# Altium footprint library Amin-Library.PcbLib: 601 footprints (part 31 of 38)
Each footprint in its own frame and in the unit in brackets; x right, y up, seen from the top. Pads: shape width x height; smd on the part's side, far side on the other; paste and mask are expansions set on the pad; w line width, h text height; cw(c..) or ccw(c..) is an arc to the next point about the centre after c.
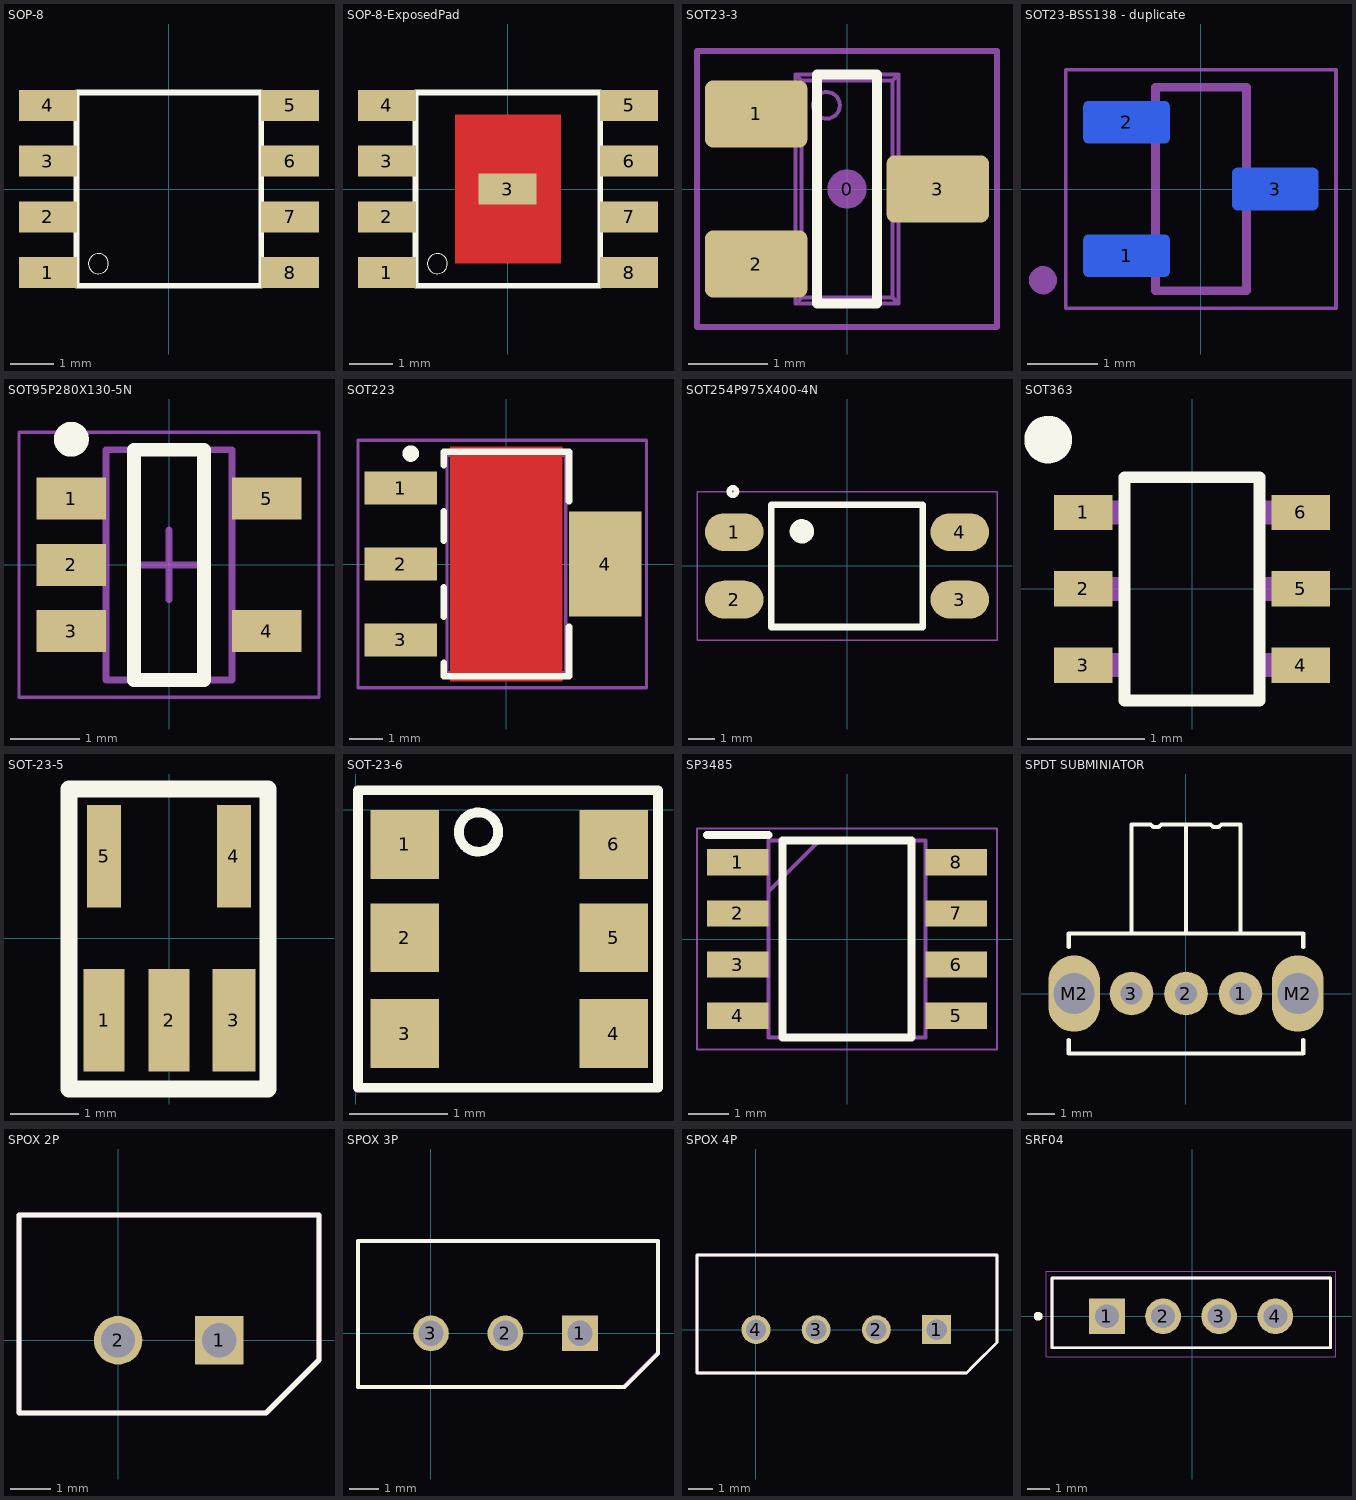
[diagram p30: the footprints below, top view; thin cyan lines are the x and y axes]

## SOP-8 [mil]
pads (8):
  rect 52x28 smd: 1(-108.27,-75) 2(-108.27,-25) 3(-108.27,25) 4(-108.27,75) 5(109,75) 6(109,25) 7(109,-25) 8(109,-75)
Top Overlay:
  circle w0: c-62.99,-67 r9
  lines w5: -82.68,-87 -82.68,86.61 83,86.61 83,-87 -82.68,-87
3D body "SOP8.stp": height 68.9, standoff 0, extent -118,-96.25 118.02,96.27

## SOP-8-ExposedPad [mil]
pads (9):
  rect 52x28 smd: 1(-108.27,-75) 2(-108.27,-25) 3(-108.27,25) 3(0,0) 4(-108.27,75) 5(109,75) 6(109,25) 7(109,-25) 8(109,-75)
Top Layer:
  rectangle: -47.24,-67 48,66.93
Top Overlay:
  circle w0: c-62.99,-67 r9
  lines w5: -82.68,-87 -82.68,86.61 83,86.61 83,-87 -82.68,-87

## SOT23-3 [mm] "SOT23, 3 pin"
height 1.003
pads (4):
  round 0.5 on Mech15: 0(0,0)
  rrect25% 1.3x0.85 smd: 1(-1.15,0.95) 2(-1.15,-0.95) 3(1.15,0)
Top Overlay:
  lines w0.127: -0.381,-1.45 0.381,-1.45 0.381,1.45 -0.381,1.45 -0.381,-1.45
  text "." at -2.125,0.95 h1.4
Mechanical 13:
  circle w0.05: c-0.26,1.06 r0.169
  lines w0.05: -1.19,-1.19 -1.19,-0.71 ; -1.19,0.71 -1.19,1.19 ; -1.099,-1.19 -1.099,-0.71 ; -1.099,0.71 -1.099,1.19 ; -1.074,-1.19 -1.074,-0.71 ; -1.074,0.71 -1.074,1.19 ; -0.825,-1.19 -0.825,-0.71 ; -0.825,0.71 -0.825,1.19 ; -0.65,-1.19 -1.4,-1.19 -1.4,-0.71 -0.65,-0.71 ; -0.65,0.71 -1.4,0.71 -1.4,1.19 -0.65,1.19 ; 0.65,-0.24 1.4,-0.24 1.4,0.24 0.65,0.24 ; 0.825,-0.24 0.825,0.24 ; 1.074,-0.24 1.074,0.24 ; 1.099,-0.24 1.099,0.24 ; 1.19,-0.24 1.19,0.24 ; -0.65,-1.45 -0.576,-1.376 ; -0.65,-1.45 -0.65,1.45 ; -0.65,-1.45 0.65,-1.45 ; -0.65,1.45 0.65,1.45 ; -0.65,1.45 -0.576,1.376 ; -0.576,-1.376 -0.576,1.376 ; -0.576,-1.376 0.576,-1.376 ; -0.576,1.376 0.576,1.376 ; 0.576,-1.376 0.576,1.376 ; 0.576,-1.376 0.65,-1.45 ; 0.576,1.376 0.65,1.45 ; 0.65,-1.45 0.65,1.45
Mechanical 15:
  lines w0.076: -1.9,-1.75 1.9,-1.75 1.9,1.75 -1.9,1.75 -1.9,-1.75
3D body "SOT23-3.STEP": height 1.29, standoff -0.01, extent -1.4,-1.45 1.4,1.45

## SOT23-BSS138 - duplicate [mm]
height 0.55
pads (3):
  rrect25% 1.23x0.6 smd far side: 1(-1.06,-0.95) 2(-1.06,0.95) 3(1.06,0)
Bottom Overlay:
  circle w0.2: c-2.25,-1.3 r0.1
  lines w0.127: -0.65,-1.57 0.65,-1.57 0.65,-0.62 ; -0.65,1.57 0.65,1.57 0.65,0.62
Mechanical 13:
  circle w0.2: c-2.25,-1.3 r0.1
  lines w0.127: -0.65,-1.45 -0.65,1.45 0.65,1.45 0.65,-1.45 -0.65,-1.45
Mechanical 15:
  lines w0.05: -1.925,-1.7 1.925,-1.7 1.925,1.7 -1.925,1.7 -1.925,-1.7
3D body "SOT-23.STEP": height 1, standoff 0, extent -1.3,-1.45 1.3,1.45

## SOT95P280X130-5N [mm] "SOT23, 5-Leads, Body 2.90x2.80mm, Pitch 0.95mm, IPC Medium Density"
height 1.3
pads (5):
  rect 1x0.6 smd: 1(-1.4,0.95) 2(-1.4,0) 3(-1.4,-0.95) 4(1.4,-0.95) 5(1.4,0.95)
Top Overlay:
  circle w0.25: c-1.4,1.8 r0.125
  lines w0.2: -0.5,-1.65 -0.5,1.65 0.5,1.65 0.5,-1.65 -0.5,-1.65
Mechanical 13:
  lines w0.1: -0.9,-1.65 0.9,-1.65 0.9,1.65 -0.9,1.65 -0.9,-1.65
Mechanical 15:
  lines w0.05: -2.15,-1.9 2.15,-1.9 2.15,1.9 -2.15,1.9 -2.15,-1.9
  lines w0.1: -0.5,0 0.5,0 ; 0,-0.5 0,0.5
3D body: height 1.3, standoff 0.05, extent -0.9,-1.65 0.9,1.65

## SOT223 [mm] "SOT223, 4-Leads, Body 6.5x3.5mm, Pitch 2.30mm-Designer Abbas Basereh"
height 1.8
pads (4):
  rect 2.2x1 smd: 1(-3.2,2.3) 2(-3.2,0) 3(-3.2,-2.3)
  rect 2.2x3.2 smd: 4(3,0)
Top Layer:
  pour cut-out: -1.7,3.556 1.7,3.556 1.7,-3.556 -1.7,-3.556
Top Overlay:
  circle w0.25: c-2.9,3.35 r0.125
  lines w0.2: -1.9,-3 -1.9,-3.4 1.9,-3.4 1.9,-1.9 ; -1.9,-1.6 -1.9,-0.7 ; -1.9,0.7 -1.9,1.6 ; -1.9,3 -1.9,3.4 1.9,3.4 1.9,1.9
Mechanical 13:
  lines w0.1: -1.8,-3.3 -1.8,3.3 1.8,3.3 1.8,-3.3 -1.8,-3.3
Mechanical 15:
  lines w0.1: -0.5,0 0.5,0 ; 0,-0.5 0,0.5 ; -4.5,-3.75 4.25,-3.75 4.25,3.75 -4.5,3.75 -4.5,-3.75
3D body "User Library-SOT223-3.step": height 1.7, standoff 0, extent -3.5,-3.25 3.5,3.25

## SOT254P975X400-4N [mil]
pads (4):
  oval 87x56 smd: 1(-167.32,50) 2(-167.32,-50) 3(167.32,-50) 4(167.32,50)
Top Overlay:
  circle w7.87: c-66.93,51.18 r14.2
  circle w7.87: c-169.29,110.24 r5.57
  region: -78.81,62.99 -55.12,62.99 -55.12,39.41 -78.81,39.41
  lines w10: -112.2,-90.55 112.2,-90.55 112.2,90.55 -112.2,90.55 -112.2,-90.55
Mechanical 4:
  lines w2.05: -222.44,-110.24 222.44,-110.24 222.44,110.24 -222.44,110.24 -222.44,-110.24
3D body "User Library-PC817_Gullwing.STEP": height 148.9, standoff -2.73, extent -196.84,-90.16 196.86,90.15

## SOT363 [mm]
pads (6):
  rect 0.5x0.3 smd paste-0.025 mask+0: 1(-0.925,0.65) 2(-0.925,0) 3(-0.925,-0.65) 4(0.925,-0.65) 5(0.925,0) 6(0.925,0.65)
Top Overlay:
  circle w0.2: c-1.225,1.27 r0.103
  lines w0.102: -0.575,-0.95 -0.575,0.95 0.575,0.95 0.575,-0.95 -0.575,-0.95
Top Solder:
  region: 1.225,0.45 0.6,0.45 0.6,0.85 1.225,0.85
  region: 1.225,-0.2 0.6,-0.2 0.6,0.2 1.225,0.2
  region: 1.225,-0.85 0.6,-0.85 0.6,-0.45 1.225,-0.45
  region: -0.6,-0.85 -1.225,-0.85 -1.225,-0.45 -0.6,-0.45
  region: -0.6,-0.2 -1.225,-0.2 -1.225,0.2 -0.6,0.2
  region: -0.6,0.45 -1.225,0.45 -1.225,0.85 -0.6,0.85
Mechanical 13:
  region: 1.05,0.55 0.575,0.55 0.575,0.75 1.05,0.75
  region: 1.05,-0.1 0.575,-0.1 0.575,0.1 1.05,0.1
  region: 1.05,-0.75 0.575,-0.75 0.575,-0.55 1.05,-0.55
  region: -0.575,-0.75 -1.05,-0.75 -1.05,-0.55 -0.575,-0.55
  region: -0.575,-0.1 -1.05,-0.1 -1.05,0.1 -0.575,0.1
  region: -0.575,0.55 -1.05,0.55 -1.05,0.75 -0.575,0.75
3D body "step_temp.STEP": height 1, standoff 0, extent -1.05,-1 1.05,1

## SOT-23-5 [mm]
height 4.32
pads (5):
  rect 0.6x1.5 smd: 1(-0.95,-1.2) 2(0,-1.2)
  rect 0.63x1.5 smd: 3(0.95,-1.2)
  rect 0.5x1.5 smd: 4(0.95,1.2) 5(-0.95,1.2)
Top Overlay:
  lines w0.254: -1.466,-2.21 -1.466,2.184 1.45,2.184 1.45,-2.21 -1.466,-2.21
3D body "SOT23-5.STEP": height 1.45, standoff 0, extent -1.45,-1.276 1.45,1.524

## SOT-23-6 [mm]
pads (6):
  rect 0.7x0.7 smd: 1(0.5,-0.35) 2(0.5,-1.3) 3(0.5,-2.275) 4(2.625,-2.275) 5(2.625,-1.3) 6(2.625,-0.35)
Top Overlay:
  circle w0.1: c1.25,-0.225 r0.2
  lines w0.1: 0.025,-2.825 0.025,0.2 3.075,0.2 3.075,-2.825 0.025,-2.825
3D body "SOT23-6.step": height 1.09, standoff 0, extent 0.362,-2.719 2.788,0.075

## SP3485 [mm]
pads (8):
  rect 1.525x0.65 smd: 1(-2.712,1.905) 2(-2.712,0.635) 3(-2.712,-0.635) 4(-2.712,-1.905) 5(2.712,-1.905) 6(2.712,-0.635) 7(2.712,0.635) 8(2.712,1.905)
Top Overlay:
  lines w0.2: -3.475,2.58 -1.95,2.58 ; -1.6,-2.45 1.6,-2.45 1.6,2.45 -1.6,2.45 -1.6,-2.45
Mechanical 13:
  lines w0.1: -1.95,1.18 -0.68,2.45 ; -1.95,-2.45 1.95,-2.45 1.95,2.45 -1.95,2.45 -1.95,-2.45
Mechanical 15:
  lines w0.05: -3.725,-2.75 3.725,-2.75 3.725,2.75 -3.725,2.75 -3.725,-2.75
3D body "FR9886SOGTR.stp": height 1.75, standoff 0, extent -3,-2.45 3,2.45

## SPDT SUBMINIATOR [mm] "Subminiator SPDT switch"
pads (5):
  round 1.6 hole 0.8: 1(2,0) 2(0,0) 3(-2,0)
  oval 1.9x2.8 hole 1.5: M2(-4.1,0) M2(4.1,0)
Top Overlay:
  lines w0.15: -4.3,-1.7 -4.3,-2.2 4.3,-2.2 4.3,-1.7 ; -4.3,1.7 -4.3,2.2 4.3,2.2 4.3,1.7 ; -2,2.2 -2,6.2 -1.3,6.2 -1.2,6.1 -1,6.1 -0.9,6.2 0,6.2 ; 0,2.2 0,6.2 ; 2,2.2 2,6.2 1.3,6.2 1.2,6.1 1,6.1 0.9,6.2 0,6.2
3D body "User Library-CK_Slide.step": height 4.7, standoff -2.79, extent -4.311,-2.28 4.3,6.093

## SPOX 2P [mm]
pads (2):
  rect 1.2x1.2 hole 0.85 mask+0.076: 1(2.5,0)
  round 1.2 hole 0.85 mask+0.076: 2(0,0)
Top Overlay:
  lines w0.127: -2.45,-1.8 3.661,-1.8 4.97,-0.491 4.97,3.1 -2.45,3.1 -2.45,-1.8
Bottom Solder:
  circle w0.676: c2.5,0 r0.338
Mechanical 13:
  lines w0.127: -2.45,-1.8 3.661,-1.8 4.97,-0.491 4.97,3.1 -2.45,3.1 -2.45,-1.8
3D body "70372651.stp": height 5.81, standoff -3.59, extent -2.43,-1.795 4.97,3.105

## SPOX 3P [mm]
pads (3):
  rect 1.2x1.2 hole 0.85 mask+0.076: 1(5,0)
  round 1.2 hole 0.85 mask+0.076: 2(2.5,0) 3(0,0)
Top Overlay:
  lines w0.127: -2.45,-1.8 -2.45,3.1 7.62,3.1 7.62,-0.676 6.496,-1.8 -2.45,-1.8
Bottom Solder:
  circle w0.676: c5,0 r0.338
  circle w0.676: c2.5,0 r0.338
Mechanical 13:
  lines w0.127: -2.45,-1.8 -2.45,3.1 7.62,3.1 7.62,-0.635 6.455,-1.8 -2.45,-1.8
3D body "099990987.stp": height 5.81, standoff -3.59, extent -2.365,-1.8 7.535,3.1

## SPOX 4P [mm]
pads (4):
  rect 1.2x1.2 hole 0.85 mask+0.076: 1(7.5,0)
  round 1.2 hole 0.85 mask+0.076: 2(5,0) 3(2.5,0) 4(0,0)
Top Overlay:
  lines w0.127: -2.45,-1.8 8.741,-1.8 9.017,-1.524 10.01,-0.531 10.01,3.1 -2.45,3.1 -2.45,-1.8
Bottom Solder:
  circle w0.676: c7.5,0 r0.338
  circle w0.676: c5,0 r0.338
  circle w0.676: c2.5,0 r0.338
Mechanical 13:
  lines w0.127: -2.45,-1.8 -2.45,3.1 10.01,3.1 10.01,-0.531 8.741,-1.8 -2.45,-1.8
3D body "022035045.stp": height 5.81, standoff -3.59, extent -2.39,-1.8 10.01,3.1

## SRF04 [mm]
pads (4):
  rect 1.59x1.59 hole 1.06: 1(-3.8,0)
  round 1.59 hole 1.06: 2(-1.3,0) 3(1.2,0) 4(3.7,0)
Top Overlay:
  circle w0.2: c-6.86,0 r0.1
  lines w0.127: -6.25,-1.4 6.15,-1.4 6.15,1.7 -6.25,1.7 -6.25,-1.4
Mechanical 13:
  lines w0.127: -6.25,-1.4 6.15,-1.4 6.15,1.7 -6.25,1.7 -6.25,-1.4
Mechanical 15:
  lines w0.05: -6.5,-1.8 6.4,-1.8 6.4,2 -6.5,2 -6.5,-1.8
3D body "HCSR04 Ultrasonic Sensor.STEP": height 20.5, standoff -6.1, extent -22.6,-17.6 22.4,0.4